# Altium footprint library Mechanical.PcbLib: 49 footprints (part 2 of 4)
Each footprint in its own frame and in the unit in brackets; x right, y up, seen from the top. Pads: shape width x height; smd on the part's side, far side on the other; paste and mask are expansions set on the pad; w line width, h text height; cw(c..) or ccw(c..) is an arc to the next point about the centre after c.
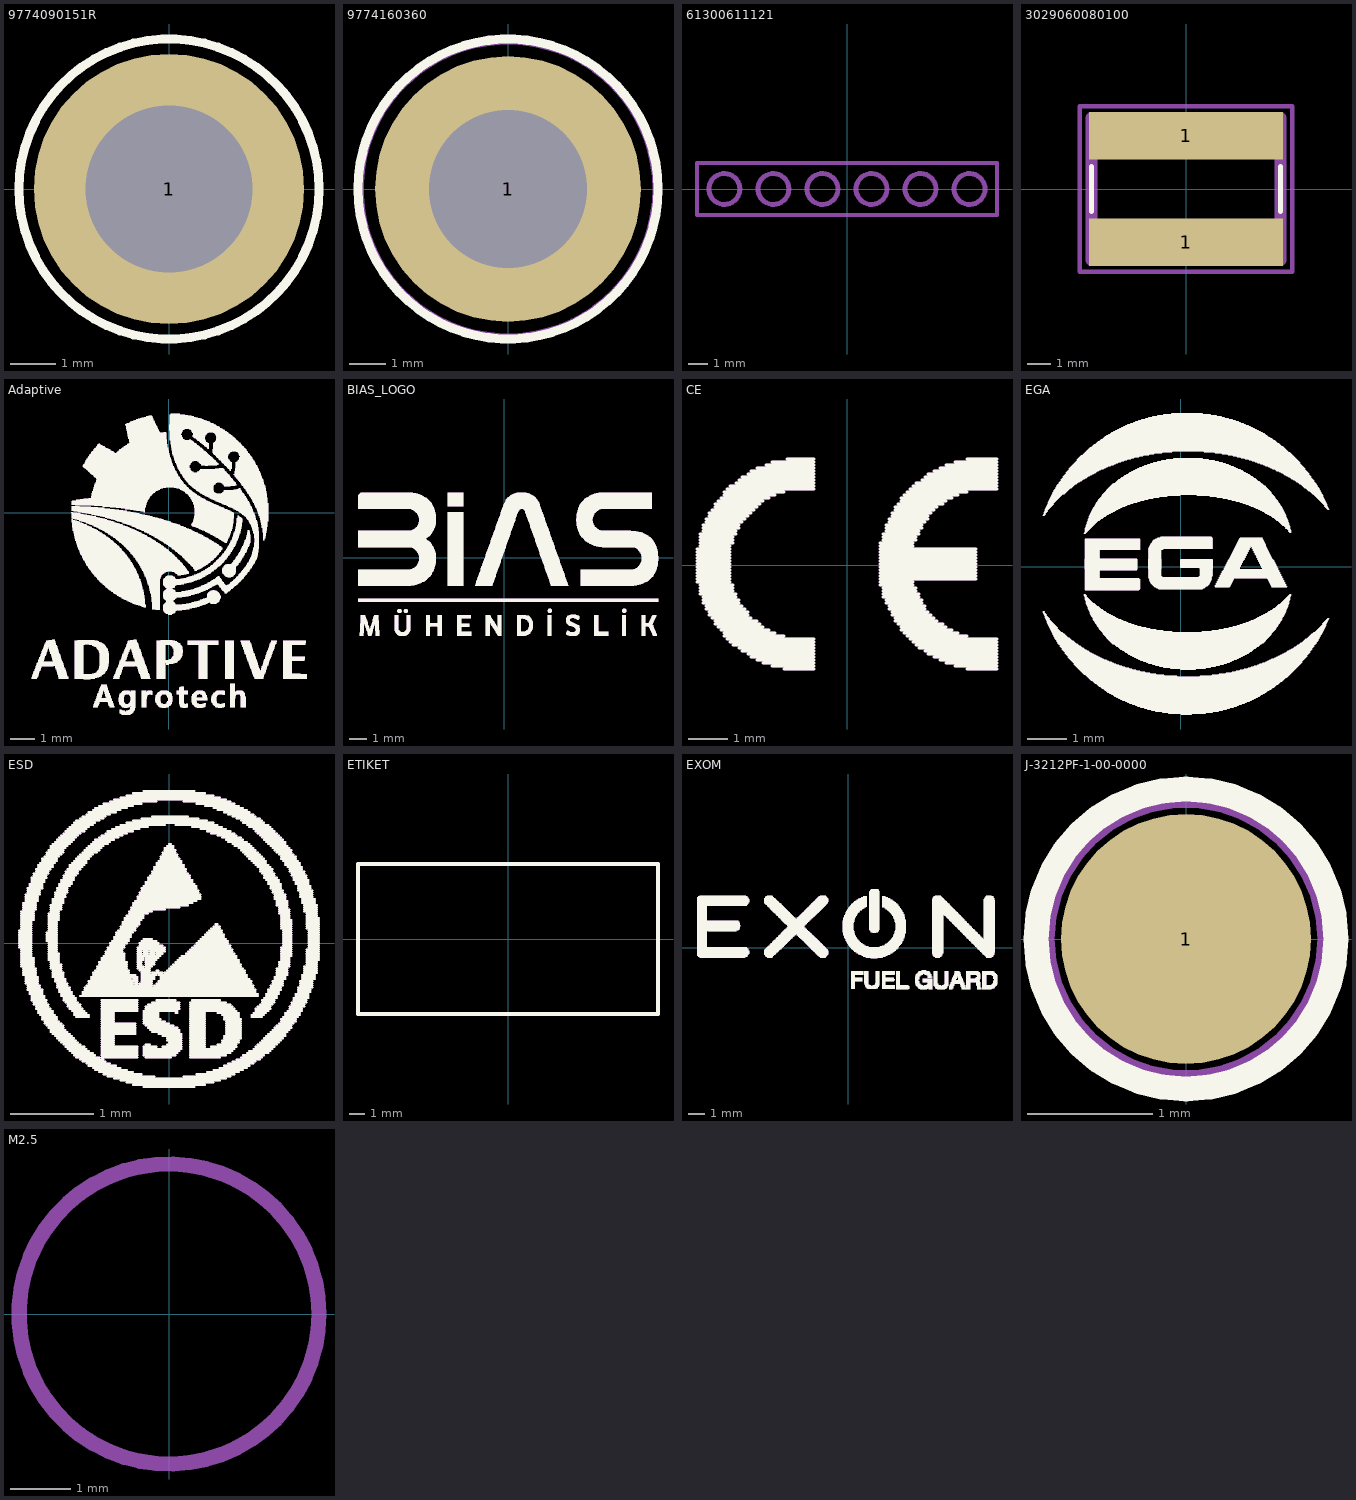
[diagram p1: the footprints below, top view; thin cyan lines are the x and y axes]

## 9774090151R [mm]
pads (1):
  round 6 / inner round 0 / far side round 0 hole 3.7 unplated: 1(0,0)
Top Overlay:
  circle w0.2: c0,0 r3.329
Top Paste:
  region: 0.325,2.902 0.57,2.874 1.044,2.738 1.488,2.524 1.89,2.239 2.239,1.89 2.524,1.488 2.738,1.044 2.874,0.57 2.902,0.325 1.872,0.325 1.842,0.467 1.749,0.743 1.615,1.002 1.443,1.237 1.237,1.442 1.002,1.614 0.744,1.748 0.468,1.842 0.325,1.872
  region: 2.902,-0.325 2.874,-0.57 2.738,-1.044 2.524,-1.488 2.239,-1.89 1.89,-2.239 1.488,-2.524 1.044,-2.738 0.57,-2.874 0.325,-2.902 0.325,-1.872 0.467,-1.842 0.743,-1.749 1.002,-1.615 1.237,-1.443 1.442,-1.237 1.614,-1.002 1.748,-0.744 1.842,-0.468 1.872,-0.325
  region: -0.325,-2.902 -0.57,-2.874 -1.044,-2.738 -1.488,-2.524 -1.89,-2.239 -2.239,-1.89 -2.524,-1.488 -2.738,-1.044 -2.874,-0.57 -2.902,-0.325 -1.872,-0.325 -1.842,-0.467 -1.749,-0.743 -1.615,-1.002 -1.443,-1.237 -1.237,-1.442 -1.002,-1.614 -0.744,-1.748 -0.468,-1.842 -0.325,-1.872
  region: -2.902,0.325 -2.874,0.57 -2.738,1.044 -2.524,1.488 -2.239,1.89 -1.89,2.239 -1.488,2.524 -1.044,2.738 -0.57,2.874 -0.325,2.902 -0.325,1.872 -0.467,1.842 -0.743,1.749 -1.002,1.615 -1.237,1.443 -1.442,1.237 -1.614,1.002 -1.748,0.744 -1.842,0.468 -1.872,0.325
Top Assembly:
  circle w0.1: c0,0 r2.55
  circle w0.1: c0,0 r2.55
  text ".Designator" at -7.498,-0.5 h1.5
Mechanical 15:
  lines w0.05: -0.5,0 0.5,0 ; 0,-0.5 0,0.5
3D body "9774090151 (rev1).stp": height 9, standoff -1.4, extent -2.55,-2.55 2.55,2.55

## 9774160360 [mm] "SMT Steel Spacer with internal Thread M3, height 16mm"
height 16
pads (1):
  round 7.4 / inner round 0 / far side round 0 hole 4.4 unplated: 1(0,0)
Top Overlay:
  circle w0.254: c0,0 r4.177
Top Paste:
  region: 0.4,3.613 0.4,2.204 0.566,2.167 0.886,2.057 1.186,1.9 1.46,1.699 1.699,1.46 1.9,1.186 2.057,0.886 2.167,0.566 2.204,0.4 3.613,0.4 3.59,0.603 3.5,1.003 3.365,1.389 3.188,1.758 2.97,2.105 2.715,2.425 2.426,2.715 2.106,2.97 1.759,3.188 1.39,3.365 1.003,3.5 0.604,3.59 0.4,3.613
  region: 3.613,-0.4 2.204,-0.4 2.167,-0.566 2.057,-0.886 1.9,-1.186 1.699,-1.46 1.46,-1.699 1.186,-1.9 0.886,-2.057 0.566,-2.167 0.4,-2.204 0.4,-3.613 0.603,-3.59 1.003,-3.5 1.389,-3.365 1.758,-3.188 2.105,-2.97 2.425,-2.715 2.715,-2.426 2.97,-2.106 3.188,-1.759 3.365,-1.39 3.5,-1.003 3.59,-0.604 3.613,-0.4
  region: -0.4,-3.613 -0.4,-2.204 -0.566,-2.167 -0.886,-2.057 -1.186,-1.9 -1.46,-1.699 -1.699,-1.46 -1.9,-1.186 -2.057,-0.886 -2.167,-0.566 -2.204,-0.4 -3.613,-0.4 -3.59,-0.603 -3.5,-1.003 -3.365,-1.389 -3.188,-1.758 -2.97,-2.105 -2.715,-2.425 -2.426,-2.715 -2.106,-2.97 -1.759,-3.188 -1.39,-3.365 -1.003,-3.5 -0.604,-3.59 -0.4,-3.613
  region: -3.613,0.4 -2.204,0.4 -2.167,0.566 -2.057,0.886 -1.9,1.186 -1.699,1.46 -1.46,1.699 -1.186,1.9 -0.886,2.057 -0.566,2.167 -0.4,2.204 -0.4,3.613 -0.603,3.59 -1.003,3.5 -1.389,3.365 -1.758,3.188 -2.105,2.97 -2.425,2.715 -2.715,2.426 -2.97,2.106 -3.188,1.759 -3.365,1.39 -3.5,1.003 -3.59,0.604 -3.613,0.4
Top Assembly:
  circle w0.1: c0,0 r1.5
  circle w0.1: c0,0 r3
  region: 0,-1.5 0.147,-1.493 0.435,-1.435 0.707,-1.323 0.952,-1.16 1.16,-0.952 1.323,-0.707 1.435,-0.435 1.493,-0.147 1.5,0 3,0 3,-0.025 3,-0.222 2.949,-0.612 2.847,-0.991 2.696,-1.355 2.5,-1.695 2.26,-2.007 1.982,-2.285 1.67,-2.525 1.33,-2.721 0.966,-2.872 0.587,-2.974 0.197,-3.025 0,-3.025
  region: 0,1.5 -0.147,1.493 -0.435,1.435 -0.707,1.323 -0.952,1.16 -1.16,0.952 -1.323,0.707 -1.435,0.435 -1.493,0.147 -1.5,0 -3,0 -3,0.025 -3,0.222 -2.949,0.612 -2.847,0.991 -2.696,1.355 -2.5,1.695 -2.26,2.007 -1.982,2.285 -1.67,2.525 -1.33,2.721 -0.966,2.872 -0.587,2.974 -0.197,3.025 0,3.025
  region: -1.475,0 -1.468,-0.147 -1.41,-0.435 -1.298,-0.707 -1.135,-0.952 -0.927,-1.16 -0.682,-1.323 -0.41,-1.435 -0.122,-1.493 0.025,-1.5 0.025,-3 0,-3 -0.197,-3 -0.587,-2.949 -0.966,-2.847 -1.33,-2.696 -1.67,-2.5 -1.982,-2.26 -2.26,-1.982 -2.5,-1.67 -2.696,-1.33 -2.847,-0.966 -2.949,-0.587 -3,-0.197 -3,0
  region: 1.5,0 1.493,0.147 1.435,0.435 1.323,0.707 1.16,0.952 0.952,1.16 0.707,1.323 0.435,1.435 0.147,1.493 0,1.5 0,3 0.025,3 0.222,3 0.612,2.949 0.991,2.847 1.355,2.696 1.695,2.5 2.007,2.26 2.285,1.982 2.525,1.67 2.721,1.33 2.872,0.966 2.974,0.587 3.025,0.197 3.025,0
  text ".Designator" at -4.9,3.592 h1
Mechanical 15:
  circle w0.1: c0,0 r4.07
3D body "9774160360.stp": height 16, standoff -1.4, extent -2.997,-3 2.997,2.988

## 61300611121 [mm] "Pin Header, pitch 2.54 mm, THT, Vertical, single row, 6p"
height 8.54
Top Assembly:
  circle w0.254: c-3.81,0 r0.8
  circle w0.254: c-1.27,0 r0.8
  circle w0.254: c1.27,0 r0.8
  circle w0.254: c3.81,0 r0.8
  circle w0.254: c6.35,0 r0.8
  circle w0.254: c-6.35,0 r0.8
  lines w0.2: -7.77,-1.345 -7.77,1.345 7.77,1.345 7.77,-1.345 -7.77,-1.345
3D body "61300611121.stp": height 14.05, standoff 2.51, extent -7.62,-1.27 7.62,1.27

## 618009221823 [mm]
3D body "618009221823 (rev1).stp": height 30.83, standoff 0.01, extent -6.255,-9.06 6.295,12.3

## 3029060080100 [mm] "Surface Mount Solderable Gasket, size 8x6mm"
height 10
pads (2):
  rect 8.2x2 smd: 1(0,-2.25) 1(0,2.25)
Top Overlay:
  lines w0.2: -4,-0.95 -4,0.95 ; 4,-0.95 4,0.95
Top Assembly:
  lines w0.5: -4,-3 4,-3 4,3 -4,3 -4,-3
  text ".Designator" at -4.998,-0.333 h1
Mechanical 15:
  lines w0.2: -4.5,-3.5 -4.5,3.5 4.5,3.5 4.5,-3.5 -4.5,-3.5
3D body "3029060080100.stp": height 10, standoff 0, extent -4,-3 4,3

## A-705 [mm] "Button"
3D body: height 3.3, standoff 0, extent -5,-5 5,5
3D body: height 4.6, standoff 3.3, extent -11.5,-11.5 11.5,11.5
3D body: height 10.25, standoff 4.6, extent -9.7,-9.7 9.7,9.7

## Adaptive [mm]
Top Overlay:
  drawing of 2644 lines, arcs and shapes, not listed
Top Assembly:
  drawing of 2644 lines, arcs and shapes, not listed

## BIAS_LOGO [mm]
Top Overlay:
  drawing of 1809 lines, arcs and shapes, not listed
Top Assembly:
  drawing of 1809 lines, arcs and shapes, not listed

## CE [mm]
Top Overlay:
  lines w0.076: -3.81,-0.432 -2.972,-0.432 ; -3.81,-0.356 -2.972,-0.356 ; -3.81,-0.279 -2.972,-0.279 ; -3.81,-0.203 -2.972,-0.203 ; -3.81,-0.127 -2.972,-0.127 ; -3.81,-0.051 -2.972,-0.051 ; -3.81,0.025 -2.972,0.025 ; -3.81,0.102 -2.972,0.102 ; -3.81,0.178 -2.972,0.178 ; -3.81,0.254 -2.972,0.254 ; -3.81,0.33 -2.972,0.33 ; -3.81,0.406 -2.972,0.406 ; -3.734,-0.737 -2.819,-0.737 ; -3.734,-0.66 -2.896,-0.66 ; -3.734,-0.584 -2.896,-0.584 ; -3.734,-0.508 -2.896,-0.508 ; -3.734,0.483 -2.972,0.483 ; -3.734,0.559 -2.896,0.559 ; -3.734,0.635 -2.896,0.635 ; -3.734,0.711 -2.896,0.711 ; -3.734,0.787 -2.819,0.787 ; -3.658,-0.965 -2.743,-0.965 ; -3.658,-0.889 -2.743,-0.889 ; -3.658,-0.813 -2.819,-0.813 ; -3.658,0.864 -2.819,0.864 ; -3.658,0.94 -2.743,0.94 ; -3.658,1.016 -2.743,1.016 ; -3.581,-1.118 -2.591,-1.118 ; -3.581,-1.041 -2.667,-1.041 ; -3.581,1.092 -2.667,1.092 ; -3.581,1.168 -2.591,1.168 ; -3.505,-1.27 -2.515,-1.27 ; -3.505,-1.194 -2.515,-1.194 ; -3.505,1.245 -2.515,1.245 ; -3.505,1.321 -2.438,1.321 ; -3.429,-1.346 -2.438,-1.346 ; -3.429,1.397 -2.362,1.397 ; -3.353,-1.499 -2.21,-1.499 ; -3.353,-1.422 -2.286,-1.422 ; -3.353,1.473 -2.286,1.473 ; -3.353,1.549 -2.21,1.549 ; -3.277,-1.575 -2.134,-1.575 ; -3.277,1.626 -2.134,1.626 ; -3.2,-1.651 -1.981,-1.651 ; -3.2,1.702 -1.981,1.702 ; -3.124,-1.803 -1.6,-1.803 ; -3.124,-1.727 -1.829,-1.727 ; -3.124,1.778 -1.829,1.778 ; -3.124,1.854 -1.6,1.854 ; -3.048,-1.88 -0.838,-1.88 ; -3.048,1.93 -0.838,1.93 ; -2.972,-1.956 -0.838,-1.956 ; -2.972,2.007 -0.838,2.007 ; -2.896,-2.032 -0.838,-2.032 ; -2.819,2.083 -0.838,2.083 ; -2.743,-2.108 -0.838,-2.108 ; -2.743,2.159 -0.838,2.159 ; -2.667,-2.184 -0.838,-2.184 ; -2.667,2.235 -0.838,2.235 ; -2.515,-2.261 -0.838,-2.261 ; -2.515,2.311 -0.838,2.311 ; -2.438,-2.337 -0.838,-2.337 ; -2.438,2.388 -0.838,2.388 ; -2.286,-2.413 -0.838,-2.413 ; -2.286,2.464 -0.838,2.464 ; -2.134,-2.489 -0.838,-2.489 ; -2.057,2.54 -0.838,2.54 ; -1.905,-2.565 -0.838,-2.565 ; -1.905,2.616 -0.838,2.616 ; -1.6,-2.642 -0.838,-2.642 ; -1.524,2.692 -0.838,2.692 ; 0.838,-0.508 1.676,-0.508 ; 0.838,-0.432 1.676,-0.432 ; 0.838,-0.356 3.277,-0.356 ; 0.838,-0.279 3.277,-0.279 ; 0.838,-0.203 3.277,-0.203 ; 0.838,-0.127 3.277,-0.127 ; 0.838,-0.051 3.277,-0.051 ; 0.838,0.025 3.277,0.025 ; 0.838,0.102 3.277,0.102 ; 0.838,0.178 3.277,0.178 ; 0.838,0.254 3.277,0.254 ; 0.838,0.33 3.277,0.33 ; 0.838,0.406 3.277,0.406 ; 0.838,0.483 1.676,0.483 ; 0.838,0.559 1.676,0.559 ; 0.914,-0.813 1.829,-0.813 ; 0.914,-0.737 1.829,-0.737 ; 0.914,-0.66 1.753,-0.66 ; 0.914,-0.584 1.753,-0.584 ; 0.914,0.635 1.753,0.635 ; 0.914,0.711 1.753,0.711 ; 0.914,0.787 1.829,0.787 ; 0.991,-0.965 1.905,-0.965 ; 0.991,-0.889 1.905,-0.889 ; 0.991,0.864 1.829,0.864 ; 0.991,0.94 1.905,0.94 ; 0.991,1.016 1.905,1.016 ; 1.067,-1.118 1.981,-1.118 ; 1.067,-1.041 1.981,-1.041 ; 1.067,1.092 1.981,1.092 ; 1.067,1.168 2.057,1.168 ; 1.143,-1.27 2.134,-1.27 ; 1.143,-1.194 2.057,-1.194 ; 1.143,1.245 2.057,1.245 ; 1.143,1.321 2.134,1.321 ; 1.219,-1.422 2.286,-1.422 ; 1.219,-1.346 2.21,-1.346 ; 1.219,1.397 2.21,1.397 ; 1.219,1.473 2.286,1.473 ; 1.295,-1.499 2.438,-1.499 ; 1.295,1.549 2.438,1.549 ; 1.372,-1.651 2.667,-1.651 ; 1.372,-1.575 2.515,-1.575 ; 1.372,1.626 2.515,1.626 ; 1.372,1.702 2.667,1.702 ; 1.448,-1.727 2.819,-1.727 ; 1.448,1.778 2.819,1.778 ; 1.524,-1.803 3.048,-1.803 ; 1.524,1.854 3.048,1.854 ; 1.6,-1.88 3.81,-1.88 ; 1.6,1.93 3.81,1.93 ; 1.676,-1.956 3.81,-1.956 ; 1.676,2.007 3.81,2.007 ; 1.753,-2.032 3.81,-2.032 ; 1.753,2.083 3.81,2.083 ; 1.829,-2.108 3.81,-2.108 ; 1.905,2.159 3.81,2.159 ; 1.981,-2.184 3.81,-2.184 ; 1.981,2.235 3.81,2.235 ; 2.057,-2.261 3.81,-2.261 ; 2.057,2.311 3.81,2.311 ; 2.21,-2.337 3.81,-2.337 ; 2.21,2.388 3.81,2.388 ; 2.362,-2.413 3.81,-2.413 ; 2.362,2.464 3.81,2.464 ; 2.515,-2.489 3.81,-2.489 ; 2.515,2.54 3.81,2.54 ; 2.743,-2.565 3.81,-2.565 ; 2.743,2.616 3.81,2.616 ; 3.048,-2.642 3.81,-2.642 ; 3.048,2.692 3.81,2.692
Top Assembly:
  lines w0.076: -3.81,-0.432 -2.972,-0.432 ; -3.81,-0.356 -2.972,-0.356 ; -3.81,-0.279 -2.972,-0.279 ; -3.81,-0.203 -2.972,-0.203 ; -3.81,-0.127 -2.972,-0.127 ; -3.81,-0.051 -2.972,-0.051 ; -3.81,0.025 -2.972,0.025 ; -3.81,0.102 -2.972,0.102 ; -3.81,0.178 -2.972,0.178 ; -3.81,0.254 -2.972,0.254 ; -3.81,0.33 -2.972,0.33 ; -3.81,0.406 -2.972,0.406 ; -3.734,-0.737 -2.819,-0.737 ; -3.734,-0.66 -2.896,-0.66 ; -3.734,-0.584 -2.896,-0.584 ; -3.734,-0.508 -2.896,-0.508 ; -3.734,0.483 -2.972,0.483 ; -3.734,0.559 -2.896,0.559 ; -3.734,0.635 -2.896,0.635 ; -3.734,0.711 -2.896,0.711 ; -3.734,0.787 -2.819,0.787 ; -3.658,-0.965 -2.743,-0.965 ; -3.658,-0.889 -2.743,-0.889 ; -3.658,-0.813 -2.819,-0.813 ; -3.658,0.864 -2.819,0.864 ; -3.658,0.94 -2.743,0.94 ; -3.658,1.016 -2.743,1.016 ; -3.581,-1.118 -2.591,-1.118 ; -3.581,-1.041 -2.667,-1.041 ; -3.581,1.092 -2.667,1.092 ; -3.581,1.168 -2.591,1.168 ; -3.505,-1.27 -2.515,-1.27 ; -3.505,-1.194 -2.515,-1.194 ; -3.505,1.245 -2.515,1.245 ; -3.505,1.321 -2.438,1.321 ; -3.429,-1.346 -2.438,-1.346 ; -3.429,1.397 -2.362,1.397 ; -3.353,-1.499 -2.21,-1.499 ; -3.353,-1.422 -2.286,-1.422 ; -3.353,1.473 -2.286,1.473 ; -3.353,1.549 -2.21,1.549 ; -3.277,-1.575 -2.134,-1.575 ; -3.277,1.626 -2.134,1.626 ; -3.2,-1.651 -1.981,-1.651 ; -3.2,1.702 -1.981,1.702 ; -3.124,-1.803 -1.6,-1.803 ; -3.124,-1.727 -1.829,-1.727 ; -3.124,1.778 -1.829,1.778 ; -3.124,1.854 -1.6,1.854 ; -3.048,-1.88 -0.838,-1.88 ; -3.048,1.93 -0.838,1.93 ; -2.972,-1.956 -0.838,-1.956 ; -2.972,2.007 -0.838,2.007 ; -2.896,-2.032 -0.838,-2.032 ; -2.819,2.083 -0.838,2.083 ; -2.743,-2.108 -0.838,-2.108 ; -2.743,2.159 -0.838,2.159 ; -2.667,-2.184 -0.838,-2.184 ; -2.667,2.235 -0.838,2.235 ; -2.515,-2.261 -0.838,-2.261 ; -2.515,2.311 -0.838,2.311 ; -2.438,-2.337 -0.838,-2.337 ; -2.438,2.388 -0.838,2.388 ; -2.286,-2.413 -0.838,-2.413 ; -2.286,2.464 -0.838,2.464 ; -2.134,-2.489 -0.838,-2.489 ; -2.057,2.54 -0.838,2.54 ; -1.905,-2.565 -0.838,-2.565 ; -1.905,2.616 -0.838,2.616 ; -1.6,-2.642 -0.838,-2.642 ; -1.524,2.692 -0.838,2.692 ; 0.838,-0.508 1.676,-0.508 ; 0.838,-0.432 1.676,-0.432 ; 0.838,-0.356 3.277,-0.356 ; 0.838,-0.279 3.277,-0.279 ; 0.838,-0.203 3.277,-0.203 ; 0.838,-0.127 3.277,-0.127 ; 0.838,-0.051 3.277,-0.051 ; 0.838,0.025 3.277,0.025 ; 0.838,0.102 3.277,0.102 ; 0.838,0.178 3.277,0.178 ; 0.838,0.254 3.277,0.254 ; 0.838,0.33 3.277,0.33 ; 0.838,0.406 3.277,0.406 ; 0.838,0.483 1.676,0.483 ; 0.838,0.559 1.676,0.559 ; 0.914,-0.813 1.829,-0.813 ; 0.914,-0.737 1.829,-0.737 ; 0.914,-0.66 1.753,-0.66 ; 0.914,-0.584 1.753,-0.584 ; 0.914,0.635 1.753,0.635 ; 0.914,0.711 1.753,0.711 ; 0.914,0.787 1.829,0.787 ; 0.991,-0.965 1.905,-0.965 ; 0.991,-0.889 1.905,-0.889 ; 0.991,0.864 1.829,0.864 ; 0.991,0.94 1.905,0.94 ; 0.991,1.016 1.905,1.016 ; 1.067,-1.118 1.981,-1.118 ; 1.067,-1.041 1.981,-1.041 ; 1.067,1.092 1.981,1.092 ; 1.067,1.168 2.057,1.168 ; 1.143,-1.27 2.134,-1.27 ; 1.143,-1.194 2.057,-1.194 ; 1.143,1.245 2.057,1.245 ; 1.143,1.321 2.134,1.321 ; 1.219,-1.422 2.286,-1.422 ; 1.219,-1.346 2.21,-1.346 ; 1.219,1.397 2.21,1.397 ; 1.219,1.473 2.286,1.473 ; 1.295,-1.499 2.438,-1.499 ; 1.295,1.549 2.438,1.549 ; 1.372,-1.651 2.667,-1.651 ; 1.372,-1.575 2.515,-1.575 ; 1.372,1.626 2.515,1.626 ; 1.372,1.702 2.667,1.702 ; 1.448,-1.727 2.819,-1.727 ; 1.448,1.778 2.819,1.778 ; 1.524,-1.803 3.048,-1.803 ; 1.524,1.854 3.048,1.854 ; 1.6,-1.88 3.81,-1.88 ; 1.6,1.93 3.81,1.93 ; 1.676,-1.956 3.81,-1.956 ; 1.676,2.007 3.81,2.007 ; 1.753,-2.032 3.81,-2.032 ; 1.753,2.083 3.81,2.083 ; 1.829,-2.108 3.81,-2.108 ; 1.905,2.159 3.81,2.159 ; 1.981,-2.184 3.81,-2.184 ; 1.981,2.235 3.81,2.235 ; 2.057,-2.261 3.81,-2.261 ; 2.057,2.311 3.81,2.311 ; 2.21,-2.337 3.81,-2.337 ; 2.21,2.388 3.81,2.388 ; 2.362,-2.413 3.81,-2.413 ; 2.362,2.464 3.81,2.464 ; 2.515,-2.489 3.81,-2.489 ; 2.515,2.54 3.81,2.54 ; 2.743,-2.565 3.81,-2.565 ; 2.743,2.616 3.81,2.616 ; 3.048,-2.642 3.81,-2.642 ; 3.048,2.692 3.81,2.692

## EGA [mm]
Top Overlay:
  drawing of 759 lines, arcs and shapes, not listed
Top Assembly:
  drawing of 759 lines, arcs and shapes, not listed

## ESD [mm]
Top Overlay:
  drawing of 703 lines, arcs and shapes, not listed
Top Assembly:
  drawing of 703 lines, arcs and shapes, not listed

## ETIKET [mm]
Top Overlay:
  lines w0.254: -10,-5 -10,5 10,5 10,-5 -10,-5
Top Assembly:
  lines w0.254: -10,-5 -10,5 10,5 10,-5 -10,-5

## EXOM [mm]
Top Overlay:
  drawing of 1759 lines, arcs and shapes, not listed
Top Assembly:
  drawing of 1759 lines, arcs and shapes, not listed

## J-3212PF-1-00-0000 [mm]
pads (1):
  round 2 smd paste-2539.97: 1(0,0)
Top Overlay:
  circle w0.2: c0,0 r1.2
Top Assembly:
  circle w0.1: c0,0 r1.1
  text ".Designator" at -1,-0.067 h0.2
Mechanical 15:
  lines w0.05: -0.5,0 0.5,0 ; 0,-0.5 0,0.5
3D body "J-3212PF-1-00-0000 v3.step": height 3.9, standoff -0.49, extent -0.9,-0.893 0.9,0.893

## LG-18 [mm] "3mmx18mm LED Pipe"
3D body: height 19.4, standoff 17.4, extent -3.009,-2.988 2.991,3.012
3D body: height 17.4, standoff 16.4, extent -3.709,-3.688 3.691,3.712
3D body: height 16.4, standoff 1.4, extent -3,-3 3,3

## M2.5 [mm]
Bottom Designator:
  circle w0.254: c0,0 r2.5
3D body "M2.5 Civata v1.step": height -1.6, standoff -3.6, extent -2.771,-2.805 2.771,2.805